# Altium integrated library BT136S-600E_118.IntLib: 1 symbol
Pins are listed as number, name and electrical type; pins without a type are passive.

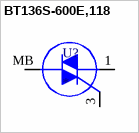
[diagram p0: symbol BT136S-600E,118]

## BT136S-600E,118
designator U?
TRIAC Logic - Sensitive Gate 600 V 4 A Surface Mount DPAK; MF: WeEn Semiconductors; MP: BT136S-600E,118; SnapEDA_Link: https://www.snapeda.com/parts/BT136S-600E,118/WeEn+Semiconductors/view-part/?ref=snap; Package: TO-252-3 WeEn Semiconductors; Value: *; Check_prices: https://www.snapeda.com/parts/BT136S-600E,118/WeEn+Semiconductors/view-part/?ref=eda
footprint IC_BT136S-600E,118
pins: 1 T1, 3 G, MB T2